# EAGLE library part GRF2543 (library GRF2543)
RF Amplifier High Gain, LNA with Bypass; IEEE 802.11 a/n/ac/p, 4.9 - 6.0 GHz Source: Datasheet <https://www.guerrilla-rf.com/products/DataSheet?sku=2543&file_name=GRF2543DS.pdf>
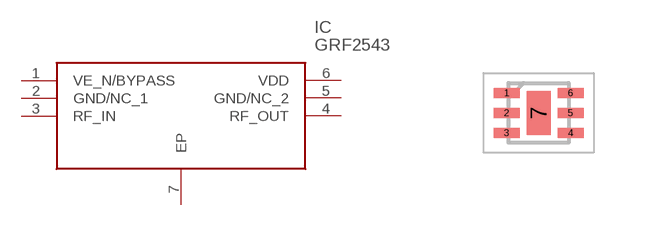
[diagram p0: symbol with the pads of SON50P150X150X45-7N; footprint SON50P150X150X45-7N]

Designator prefix IC

## GRF2543 (Description: RF Amplifier High Gain, LNA with Bypass; IEEE 802.11 a/n/ac/p, 4.9 - 6.0 GHz; Height: 0.45mm; Manufacturer_Name: Guerrilla RF; Manufacturer_Part_Number: GRF2543; Mouser_Part_Number: 459-GRF2543; Mouser_Price-Stock: https://www.mouser.co.uk/ProductDetail/Guerrilla-RF/GRF2543?qs=PqoDHHvF64%2FihZz%2FtUpOTQ%3D%3D)  [SON50P150X150X45-7N]
1  VE_N/BYPASS
2  GND/NC_1
3  RF_IN
4  RF_OUT
5  GND/NC_2
6  VDD
7  EP

## Footprint SON50P150X150X45-7N (pad centres in mm)
DFN6 1.5X1.5mm
smd 0.65 x 0.25: 1 -0.8,0.5; 2 -0.8,0; 3 -0.8,-0.5; 4 0.8,-0.5; 5 0.8,0; 6 0.8,0.5
smd 0.6 x 1.1: 7 0,0